# Altium footprint library SMBJ36CA.PcbLib: 3 footprints
Each footprint in its own frame and in the unit in brackets; x right, y up, seen from the top. Pads: shape width x height; smd on the part's side, far side on the other; paste and mask are expansions set on the pad; w line width, h text height; cw(c..) or ccw(c..) is an arc to the next point about the centre after c.
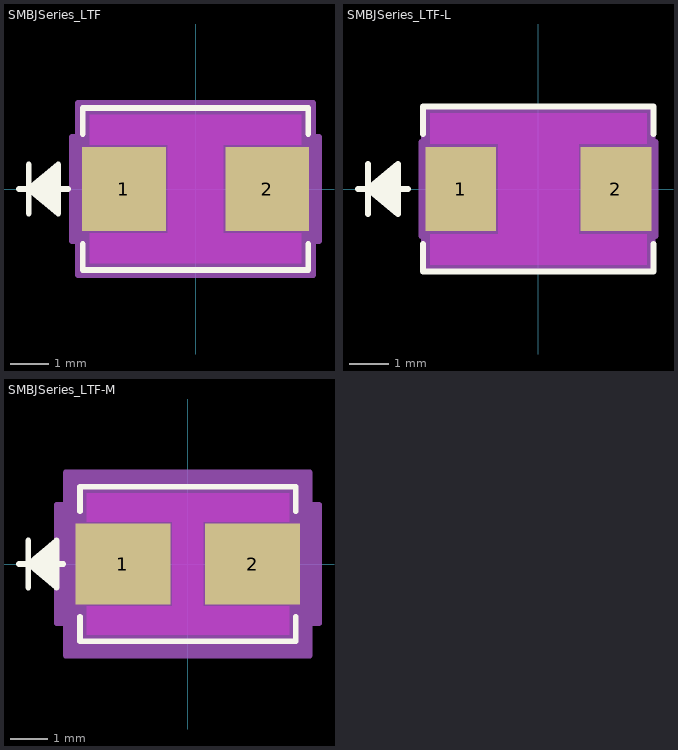
[diagram p0: the footprints below, top view; thin cyan lines are the x and y axes]

## SMBJSeries_LTF [mil]
pads (2):
  rect 85.59x86 smd paste+0 mask+0: 1(-73.11,0) 2(73.11,0)
Top Layer keep-out:
  region: -28.32,-45 -28.32,45 28.32,45 28.32,-45
  region: -108,45 -108,75.5 108,75.5 108,45
  region: -108,-75.5 -108,-45 108,-45 108,-75.5
Top Overlay:
  lines w6: -180,0 -130,0 ; -170,-25 -170,25 ; -140,-20 -170,0 ; -140,-15 -170,0 ; -140,-10 -170,0 ; -140,-5 -170,0 ; -140,5 -170,0 ; -140,10 -170,0 ; -140,15 -170,0 ; -140,20 -170,0 ; -115,-56.1 -115,-82.5 115,-82.5 115,-56.1 ; -115,56.1 -115,82.5 115,82.5 115,56.1 ; -170,0 -140,25 -140,-25 -170,0
  text ".Designator" at -137.5,-25 h50
Keep-Out Layer:
  region: -28.32,-45 -28.32,45 28.32,45 28.32,-45
Mechanical 13:
  lines w1: -180,0 -130,0 ; -170,-25 -170,25 ; -140,-20 -170,0 ; -140,-15 -170,0 ; -140,-10 -170,0 ; -140,-5 -170,0 ; -140,5 -170,0 ; -140,10 -170,0 ; -140,15 -170,0 ; -140,20 -170,0 ; -170,0 -140,25 -140,-25 -170,0 ; -110,-77.5 110,-77.5 110,77.5 -110,77.5 -110,-77.5
  text ".Designator" at -137.5,-25 h50
Mechanical 15:
  region: -120,-53 -125.91,-53 -125.91,53 -120,53 -120,87.5 120,87.5 120,53 125.91,53 125.91,-53 120,-53 120,-87.5 -120,-87.5
  lines w6: -125.91,-53 -125.91,53 -120,53 -120,87.5 120,87.5 120,53 125.91,53 125.91,-53 120,-53 120,-87.5 -120,-87.5 -120,-53 -125.91,-53
3D body "SMBJSeries_LTF.step": height 97.99, standoff 0, extent -110,-77.48 110,77.48

## SMBJSeries_LTF-L [mil]
pads (2):
  rect 70.63x84.03 smd paste+0 mask+0: 1(-77.44,0) 2(77.44,0)
Top Layer keep-out:
  region: -40.13,-45 -40.13,45 40.13,45 40.13,-45
  region: -108,45 -108,75.5 108,75.5 108,45
  region: -108,-75.5 -108,-45 108,-45 108,-75.5
Top Overlay:
  lines w6: -180,0 -130,0 ; -170,-25 -170,25 ; -140,-20 -170,0 ; -140,-15 -170,0 ; -140,-10 -170,0 ; -140,-5 -170,0 ; -140,5 -170,0 ; -140,10 -170,0 ; -140,15 -170,0 ; -140,20 -170,0 ; -115,-54.92 -115,-82.5 115,-82.5 115,-54.92 ; -115,54.92 -115,82.5 115,82.5 115,54.92 ; -170,0 -140,25 -140,-25 -170,0
  text ".Designator" at -137.5,-25 h50
Keep-Out Layer:
  region: -40.13,-45 -40.13,45 40.13,45 40.13,-45
Mechanical 13:
  lines w1: -180,0 -130,0 ; -170,-25 -170,25 ; -140,-20 -170,0 ; -140,-15 -170,0 ; -140,-10 -170,0 ; -140,-5 -170,0 ; -140,5 -170,0 ; -140,10 -170,0 ; -140,15 -170,0 ; -140,20 -170,0 ; -170,0 -140,25 -140,-25 -170,0 ; -110,-77.5 110,-77.5 110,77.5 -110,77.5 -110,-77.5
  text ".Designator" at -137.5,-25 h50
Mechanical 15:
  region: -114,-47 -116.76,-47 -116.76,47 -114,47 -114,81.5 114,81.5 114,47 116.76,47 116.76,-47 114,-47 114,-81.5 -114,-81.5
  lines w6: -116.76,-47 -116.76,47 -114,47 -114,81.5 114,81.5 114,47 116.76,47 116.76,-47 114,-47 114,-81.5 -114,-81.5 -114,-47 -116.76,-47
3D body "SMBJSeries_LTF.step": height 97.99, standoff 0, extent -110,-77.48 110,77.48

## SMBJSeries_LTF-M [mil]
pads (2):
  rect 101.34x86 smd paste+0 mask+0: 1(-69.17,0) 2(69.17,0)
Top Layer keep-out:
  region: -16.5,-45 -16.5,45 16.5,45 16.5,-45
  region: -108,45 -108,75.5 108,75.5 108,45
  region: -108,-75.5 -108,-45 108,-45 108,-75.5
Top Overlay:
  lines w6: -180,0 -132.94,0 ; -170,-25 -170,25 ; -140,-20 -170,0 ; -140,-15 -170,0 ; -140,-10 -170,0 ; -140,-5 -170,0 ; -140,5 -170,0 ; -140,10 -170,0 ; -140,15 -170,0 ; -140,20 -170,0 ; -115,-56.1 -115,-82.5 115,-82.5 115,-56.1 ; -115,56.1 -115,82.5 115,82.5 115,56.1 ; -170,0 -140,25 -140,-25 -170,0
  text ".Designator" at -137.5,-25 h50
Keep-Out Layer:
  region: -16.5,-45 -16.5,45 16.5,45 16.5,-45
Mechanical 13:
  lines w1: -180,0 -130,0 ; -170,-25 -170,25 ; -140,-20 -170,0 ; -140,-15 -170,0 ; -140,-10 -170,0 ; -140,-5 -170,0 ; -140,5 -170,0 ; -140,10 -170,0 ; -140,15 -170,0 ; -140,20 -170,0 ; -170,0 -140,25 -140,-25 -170,0 ; -110,-77.5 110,-77.5 110,77.5 -110,77.5 -110,-77.5
  text ".Designator" at -137.5,-25 h50
Mechanical 15:
  region: -130,-63 -139.84,-63 -139.84,63 -130,63 -130,97.5 130,97.5 130,63 139.84,63 139.84,-63 130,-63 130,-97.5 -130,-97.5
  lines w6: -139.84,-63 -139.84,63 -130,63 -130,97.5 130,97.5 130,63 139.84,63 139.84,-63 130,-63 130,-97.5 -130,-97.5 -130,-63 -139.84,-63
3D body "SMBJSeries_LTF.step": height 97.99, standoff 0, extent -110,-77.48 110,77.48